# Altium footprint library Footprint.PcbLib: 411 footprints (part 3 of 26)
Each footprint in its own frame and in the unit in brackets; x right, y up, seen from the top. Pads: shape width x height; smd on the part's side, far side on the other; paste and mask are expansions set on the pad; w line width, h text height; cw(c..) or ccw(c..) is an arc to the next point about the centre after c.
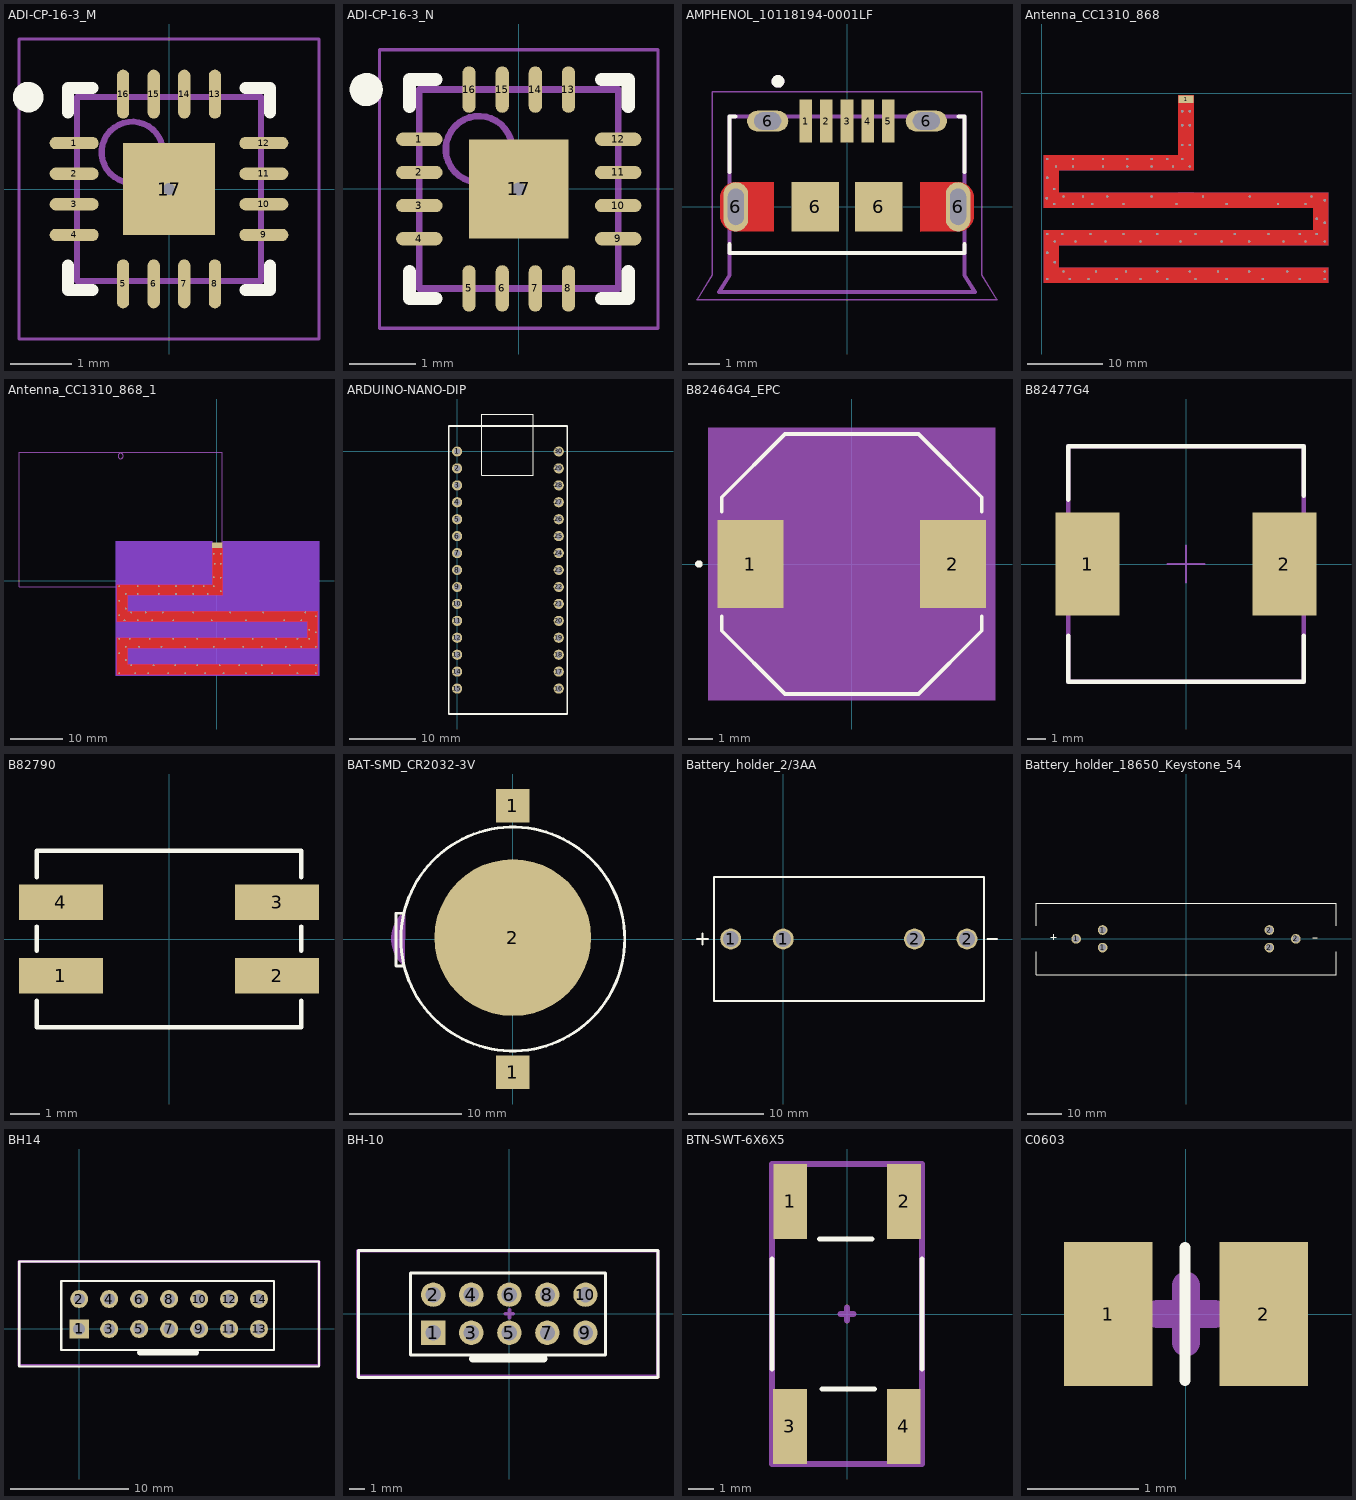
[diagram p2: the footprints below, top view; thin cyan lines are the x and y axes]

## ADI-CP-16-3_M [mm] "QFN, 16-Leads, Body 3x3mm, Pitch 0.5mm, Thermal Pad 1.5x1.5mm, IPC Low Density"
height 0.9
pads (17):
  oval 0.8x0.2 smd: 1(-1.55,0.75) 2(-1.55,0.25) 3(-1.55,-0.25) 4(-1.55,-0.75) 9(1.55,-0.75) 10(1.55,-0.25) 11(1.55,0.25) 12(1.55,0.75)
  oval 0.2x0.8 smd: 5(-0.75,-1.55) 6(-0.25,-1.55) 7(0.25,-1.55) 8(0.75,-1.55) 13(0.75,1.55) 14(0.25,1.55) 15(-0.25,1.55) 16(-0.75,1.55)
  rect 1.5x1.5 smd: 17(0,0)
via 0,0 diameter 0.5 hole 0.2
Top Overlay:
  circle w0.25: c-2.3,1.5 r0.125
  lines w0.2: -1.65,-1.25 -1.65,-1.65 -1.25,-1.65 ; -1.65,1.25 -1.65,1.65 -1.25,1.65 ; 1.25,-1.65 1.65,-1.65 1.65,-1.25 ; 1.25,1.65 1.65,1.65 1.65,1.25
Mechanical 13:
  circle w0.1: c-0.6,0.6 r0.5
  lines w0.1: -1.5,-1.5 1.5,-1.5 1.5,1.5 -1.5,1.5 -1.5,-1.5
Mechanical 15:
  lines w0.05: -2.45,-2.45 2.45,-2.45 2.45,2.45 -2.45,2.45 -2.45,-2.45
  lines w0.1: -0.5,0 0.5,0 ; 0,-0.5 0,0.5
3D body: height 0.9, standoff 0, extent -1.5,-1.5 1.5,1.5

## ADI-CP-16-3_N [mm] "QFN, 16-Leads, Body 3x3mm, Pitch 0.5mm, Thermal Pad 1.5x1.5mm, IPC Medium Density"
height 0.9
pads (17):
  oval 0.7x0.2 smd: 1(-1.5,0.75) 2(-1.5,0.25) 3(-1.5,-0.25) 4(-1.5,-0.75) 9(1.5,-0.75) 10(1.5,-0.25) 11(1.5,0.25) 12(1.5,0.75)
  oval 0.2x0.7 smd: 5(-0.75,-1.5) 6(-0.25,-1.5) 7(0.25,-1.5) 8(0.75,-1.5) 13(0.75,1.5) 14(0.25,1.5) 15(-0.25,1.5) 16(-0.75,1.5)
  rect 1.5x1.5 smd: 17(0,0)
via 0,0 diameter 0.5 hole 0.2
Top Overlay:
  circle w0.25: c-2.3,1.5 r0.125
  lines w0.2: -1.65,-1.25 -1.65,-1.65 -1.25,-1.65 ; -1.65,1.25 -1.65,1.65 -1.25,1.65 ; 1.25,-1.65 1.65,-1.65 1.65,-1.25 ; 1.25,1.65 1.65,1.65 1.65,1.25
Mechanical 13:
  circle w0.1: c-0.6,0.6 r0.5
  lines w0.1: -1.5,-1.5 1.5,-1.5 1.5,1.5 -1.5,1.5 -1.5,-1.5
Mechanical 15:
  lines w0.05: -2.1,-2.1 2.1,-2.1 2.1,2.1 -2.1,2.1 -2.1,-2.1
  lines w0.1: -0.5,0 0.5,0 ; 0,-0.5 0,0.5
3D body: height 0.9, standoff 0, extent -1.5,-1.5 1.5,1.5

## AMPHENOL_10118194-0001LF [mm] "USB_Micro-B Connector"
pads (11):
  rect 0.4x1.35 smd: 1(-1.3,2.7) 2(-0.65,2.7) 3(0,2.7) 4(0.65,2.7) 5(1.3,2.7)
  oval 0.775x1.55 hole 0.5 slot 1.15 at 90 deg: 6(-3.5,0) 6(3.5,0)
  oval 1.3x0.65 hole 0.55 slot 0.85 at 0 deg: 6(-2.5,2.7) 6(2.5,2.7)
  rect 1.5x1.55 smd: 6(-1,0) 6(1,0)
Top Layer:
  region: 192 vertices and 0 holes, not listed, extent 2.3,-0.78 4,0.775
  region: 192 vertices and 0 holes, not listed, extent -4,-0.775 -2.3,0.78
Top Overlay:
  circle w0.2: c-2.175,3.95 r0.1
  lines w0.127: -3.7,-1.18 -3.7,-1.45 3.7,-1.45 3.7,-1.18 ; -3.7,1.095 -3.7,2.85 -3.52,2.85 ; 3.52,2.85 3.7,2.85 3.7,1.095
Top Paste:
  drawing of 6 lines, arcs and shapes, not listed
Top Solder:
  region: 3.626,0.874 3.652,0.872 3.678,0.869 3.704,0.864 3.729,0.858 3.755,0.851 3.779,0.842 3.803,0.832 3.827,0.821 3.85,0.808 3.872,0.794 3.894,0.78 3.915,0.764 3.935,0.747 3.954,0.729 3.972,0.71 3.989,0.69 4.005,0.669 4.019,0.647 4.033,0.625 4.046,0.602 4.057,0.578 4.067,0.554 4.076,0.53 4.083,0.504 4.089,0.479 4.094,0.453 4.097,0.427 4.099,0.401 4.1,0.375 4.1,-0.375 4.099,-0.401 4.097,-0.427 4.094,-0.453 4.089,-0.479 4.083,-0.504 4.076,-0.53 4.067,-0.554 4.057,-0.578 4.046,-0.602 4.033,-0.625 4.019,-0.647 4.005,-0.669 3.989,-0.69 3.972,-0.71 3.954,-0.729 3.935,-0.747 3.915,-0.764 3.894,-0.78 3.872,-0.794 3.85,-0.808 3.827,-0.821 3.803,-0.832 3.779,-0.842 3.755,-0.851 3.729,-0.858 3.704,-0.864 3.678,-0.869 3.652,-0.872 3.626,-0.874 3.6,-0.875 2.2,-0.875 2.2,0.875 3.6,0.875
  region: -2.2,-0.875 -3.6,-0.875 -3.626,-0.874 -3.652,-0.872 -3.678,-0.869 -3.704,-0.864 -3.729,-0.858 -3.755,-0.851 -3.779,-0.842 -3.803,-0.832 -3.827,-0.821 -3.85,-0.808 -3.872,-0.794 -3.894,-0.78 -3.915,-0.764 -3.935,-0.747 -3.954,-0.729 -3.972,-0.71 -3.989,-0.69 -4.005,-0.669 -4.019,-0.647 -4.033,-0.625 -4.046,-0.602 -4.057,-0.578 -4.067,-0.554 -4.076,-0.53 -4.083,-0.504 -4.089,-0.479 -4.094,-0.453 -4.097,-0.427 -4.099,-0.401 -4.1,-0.375 -4.1,0.375 -4.099,0.401 -4.097,0.427 -4.094,0.453 -4.089,0.479 -4.083,0.504 -4.076,0.53 -4.067,0.554 -4.057,0.578 -4.046,0.602 -4.033,0.625 -4.019,0.647 -4.005,0.669 -3.989,0.69 -3.972,0.71 -3.954,0.729 -3.935,0.747 -3.915,0.764 -3.894,0.78 -3.872,0.794 -3.85,0.808 -3.827,0.821 -3.803,0.832 -3.779,0.842 -3.755,0.851 -3.729,0.858 -3.704,0.864 -3.678,0.869 -3.652,0.872 -3.626,0.874 -3.6,0.875 -2.2,0.875
Assembly Top:
  lines w0.127: -3.7,-1.45 3.7,-1.45 ; -3.7,-1.45 -3.7,2.85 3.7,2.85 3.7,-1.45 ; -3.7,-1.45 -3.7,-2.15 -4.025,-2.68 4.025,-2.68 3.7,-2.15 3.7,-1.45
Courtyard Top:
  lines w0.05: -4.725,-2.93 4.725,-2.93 4.25,-2.15 4.25,3.625 -4.25,3.625 -4.25,-2.15 -4.725,-2.93
Mechanical 13:
  circle w0.2: c-2.175,3.95 r0.1
3D body "10118194-0001LF--3DModel-STEP-533217.STEP": height 2.72, standoff -0.55, extent -4.025,-2.68 4.025,2.9

## Antenna_CC1310_868 [mm]
pads (84):
  rect 2x1 smd mask+0.102: 1(19.25,-0.75)
  round 0.3 hole 0.3: 5(18.75,-2.376) 6(19.75,-2.376) 7(18.75,-4.25) 8(19.75,-4.25) 9(18.75,-6.876) 10(19.75,-6.876) 11(19.75,-9.75) 12(18.75,-8.75) 13(17.5,-9.75) 14(14.673,-9.75) 15(14.673,-8.75) 16(16.75,-8.75) 17(11.423,-8.75) 18(11.423,-9.75) 19(8.173,-8.75) 20(8.173,-9.75) 21(4.173,-9.75) 22(4.173,-8.75) 23(0.75,-8.75) 24(1.923,-9.75) 25(1.673,-12.75) 26(0.75,-11.25) 27(0.673,-13.976) 28(2.923,-13.75) 29(1.673,-14.75) 30(4.173,-14.75) 31(5.5,-13.75) 32(6.75,-14.75) 33(8.75,-13.75) 34(10.923,-14.75) 35(14.673,-13.75) 36(18,-14.75) 37(21.5,-13.75) 38(24.673,-14.75) 39(27.75,-13.75) 40(31.5,-14.75) 41(36,-13.75) 42(35.173,-14.75) 43(36.673,-16.726) 44(37.75,-14.25) 45(37.75,-17.25) 46(36.673,-18.75) 47(37.75,-19.75) 48(35.173,-19.75) 49(34.423,-18.75) 50(30.25,-18.75) 51(32.25,-19.75) 52(27.673,-19.75) 53(25.75,-18.75) 54(24,-19.75) 55(20.5,-18.75) 56(18.5,-19.75) 57(15.423,-18.75) 58(13.173,-19.75) 59(10.923,-18.75) 60(8.5,-19.75) 61(6.5,-18.75) 63(4.5,-19.75) 64(2.75,-18.75) 65(0.75,-18.75) 66(1.75,-19.75) 67(1.75,-22.5) 68(2.923,-23.75) 69(0.75,-21.25) 70(0.75,-24.75) 71(3.75,-24.75) 72(6.25,-24.75) 73(10,-24.75) 74(13.173,-24.75) 75(16.75,-24.75) 76(20.5,-24.75) 77(24.673,-24.75) 78(29.5,-24.75) 79(34.423,-24.75) 80(37.75,-24.75) 81(7.25,-23.75) 82(11.25,-23.75) 83(15.423,-23.75) 84(19.75,-23.75) 85(23.5,-23.75) 86(27.673,-23.75) 87(32.75,-23.75) 88(37.75,-23.75)
Top Layer:
  region: 20.25,-0.25 18.25,-0.25 18.25,-8.25 0.25,-8.25 0.25,-15.25 36.25,-15.25 36.25,-18.25 0.25,-18.25 0.25,-25.25 38.25,-25.25 38.25,-23.25 2.25,-23.25 2.25,-20.25 38.25,-20.25 38.25,-13.25 2.25,-13.25 2.25,-10.25 20.25,-10.25
Bottom Layer:
  region: 20.25,-1.25 18.25,-1.25 18.25,-8.25 0.25,-8.25 0.25,-15.25 36.25,-15.25 36.25,-18.25 0.25,-18.25 0.25,-25.25 38.25,-25.25 38.25,-23.25 2.25,-23.25 2.25,-20.25 38.25,-20.25 38.25,-13.25 2.25,-13.25 2.25,-10.25 20.25,-10.25
3D Body Bottom:
  lines w0.025: 18.25,-13.25 19.25,-13.25 ; 19.25,-14.25 19.25,-13.25 ; 20.25,-13.25 19.25,-13.25
Multi-Layer:
  pour cut-out: 2.25,-20.25 38.25,-20.25 38.25,-23.25 2.25,-23.25
  pour cut-out: 0.25,-15.25 36.25,-15.25 36.25,-18.25 0.25,-18.25
  pour cut-out: 2.25,-10.25 20.25,-10.25 20.25,-0.25 38.25,-0.25 38.25,-13.25 2.25,-13.25
  pour cut-out: 0.25,-0.25 18.25,-0.25 18.25,-8.25 0.25,-8.25
  pour cut-out: -0.75,-0.25 -0.75,0.75 18.25,0.75 18.25,-0.25
  pour cut-out: 20.25,-0.25 20.25,0.75 39.25,0.75 39.25,-0.25
  pour cut-out: 38.25,-26.25 39.25,-26.25 39.25,-0.25 38.25,-0.25
  pour cut-out: -0.75,-25.25 -0.75,-26.25 38.25,-26.25 38.25,-25.25
  pour cut-out: 0.25,-0.25 -0.75,-0.25 -0.75,-25.25 0.25,-25.25

## Antenna_CC1310_868_1 [mm]
pads (84):
  rect 2x1 smd: 1(0.077,6.726)
  round 0.3 hole 0.3 unplated: 5(-0.6,5.1) 6(0.7,5.1) 7(-0.4,3.2) 8(0.7,3.2) 9(-0.6,0.7) 10(0.7,0.6) 11(0.7,-2) 12(-0.6,-1) 13(-1.75,-2.5) 14(-4.5,-2.5) 15(-4.5,-1) 16(-2.5,-1) 17(-7.75,-1) 18(-7.75,-2.5) 19(-11,-1) 20(-11,-2.5) 21(-15,-2.5) 22(-15,-1) 23(-18.5,-1) 24(-17.25,-2.5) 25(-17.25,-5.25) 26(-18.5,-3.75) 27(-18.5,-6.5) 28(-16.25,-6) 29(-17.5,-7.5) 30(-15,-7.5) 31(-13.5,-6) 32(-12.25,-7.5) 33(-10.25,-6) 34(-8.25,-7.5) 35(-4.5,-6) 36(-1,-7.5) 37(2.5,-6) 38(5.5,-7.5) 39(8.75,-6) 40(12.75,-7.5) 41(16.75,-6) 42(16,-7.5) 43(17.5,-9.25) 44(18.75,-6.75) 45(18.75,-9.75) 46(17.5,-11) 47(18.75,-12.5) 48(16,-12.5) 49(15.25,-11) 50(11.25,-11) 51(13,-12.5) 52(8.5,-12.5) 53(6.75,-11) 54(5,-12.5) 55(1.5,-11) 56(-0.6,-12.5) 57(-3.75,-11) 58(-6,-12.5) 59(-8.25,-11) 60(-10.5,-12.5) 61(-12.75,-11) 63(-14.75,-12.5) 64(-16.5,-11) 65(-18.5,-11) 66(-17.25,-12.5) 67(-17.25,-15) 68(-16.25,-16) 69(-18.5,-13.75) 70(-18.5,-17.5) 71(-15.5,-17.5) 72(-13,-17.5) 73(-9.25,-17.5) 74(-6,-17.5) 75(-2.25,-17.5) 76(1.25,-17.5) 77(5.5,-17.5) 78(10.5,-17.5) 79(15.25,-17.5) 80(18.75,-17.5) 81(-12,-16) 82(-7.923,-16) 83(-3.75,-16) 84(0.5,-16) 85(4.25,-16) 86(8.5,-16) 87(13.75,-16) 88(18.75,-16)
Top Layer:
  region: 1.077,6.226 -0.923,6.226 -0.923,-0.774 -18.923,-0.774 -18.923,-7.774 17.077,-7.774 17.077,-10.774 -18.923,-10.774 -18.923,-17.774 19.077,-17.774 19.077,-15.774 -16.923,-15.774 -16.923,-12.774 19.077,-12.774 19.077,-5.774 -16.923,-5.774 -16.923,-2.774 1.077,-2.774
Top Layer keep-out:
  region: 19.327,7.476 19.327,-18.024 -19.173,-18.024 -19.173,7.476 -0.923,7.476 -0.923,-0.774 -18.923,-0.774 -18.923,-7.774 17.077,-7.774 17.077,-10.774 -18.923,-10.774 -18.923,-17.774 19.077,-17.774 19.077,-15.774 -16.923,-15.774 -16.923,-12.774 19.077,-12.774 19.077,-5.774 -16.923,-5.774 -16.923,-2.774 1.077,-2.774 1.077,7.476
Bottom Layer:
  region: 1.077,6.226 -0.923,6.226 -0.923,-0.774 -18.923,-0.774 -18.923,-7.774 17.077,-7.774 17.077,-10.774 -18.923,-10.774 -18.923,-17.774 19.077,-17.774 19.077,-15.774 -16.923,-15.774 -16.923,-12.774 19.077,-12.774 19.077,-5.774 -16.923,-5.774 -16.923,-2.774 1.077,-2.774
Bottom Layer keep-out:
  region: 19.327,7.476 19.327,-18.024 -19.173,-18.024 -19.173,7.476 -0.923,7.476 -0.923,-0.774 -18.923,-0.774 -18.923,-7.774 17.077,-7.774 17.077,-10.774 -18.923,-10.774 -18.923,-17.774 19.077,-17.774 19.077,-15.774 -16.923,-15.774 -16.923,-12.774 19.077,-12.774 19.077,-5.774 -16.923,-5.774 -16.923,-2.774 1.077,-2.774 1.077,7.476
3D Body Bottom:
  lines w0.025: -0.923,-5.774 0.077,-5.774 ; 0.077,-6.774 0.077,-5.774 ; 0.077,-4.774 0.077,-5.774 ; 1.077,-5.774 0.077,-5.774
Mechanical 46:
  text "1" at -18.303,23.626 h0.2
Mechanical 55:
  circle w0.025: c-18.223,23.626 r0.502
  lines w0.025: -37.473,-1.124 -37.473,24.376 1.027,24.376 1.027,-1.124 -37.473,-1.124
Mechanical 57:
  text "JUDYTA OBUCHOWSKA" at -17.327,24.937 h0.2
Mechanical 58:
  text "ROBERT MITAL" at -17.327,24.537 h0.2
Mechanical 59:
  text "2014-08-20" at -17.327,25.287 h0.2
Mechanical 60:
  text "COPYRIGHTS 2014 @ DYNAMIC PRECISION" at -14.823,-1.324 h0.2
3D body: height 0, standoff 0, extent -19.173,-18.024 19.327,7.476
3D body: height 0, standoff 0, extent -19.173,-18.024 19.327,7.476
3D body: height 0, standoff 0, extent -37.485,-1.137 1.04,24.389

## ARDUINO-NANO-DIP [mil]
pads (30):
  round 60 hole 38: 1(0,0) 2(0,-100) 3(0,-200) 4(0,-300) 5(0,-400) 6(0,-500) 7(0,-600) 8(0,-700) 9(0,-800) 10(0,-900) 11(0,-1000) 12(0,-1100) 13(0,-1200) 14(0,-1300) 15(0,-1400) 16(600,-1400) 17(600,-1300) 18(600,-1200) 19(600,-1100) 20(600,-1000) 21(600,-900) 22(600,-800) 23(600,-700) 24(600,-600) 25(600,-500) 26(600,-400) 27(600,-300) 28(600,-200) 29(600,-100) 30(600,0)
Top Overlay:
  lines w3.94: 146.46,-140.94 449.61,-140.94 449.61,221.26 146.46,221.26 146.46,-140.94
  lines w10: 650,150 650,-1550 -50,-1550 -50,150 650.39,150.39

## B82464G4_EPC [mil]
pads (2):
  rect 106.5x142 smd paste+0 mask+0: 1(-163.25,0) 2(163.25,0)
Top Overlay:
  circle w6: c-246.5,0 r3
  lines w6: -209.5,-84.1 -209.5,-107.5 -107.5,-209.5 107.5,-209.5 209.5,-107.5 209.5,-84.1 ; -209.5,84.1 -209.5,107.5 -107.5,209.5 107.5,209.5 209.5,107.5 209.5,84.1
Assembly Bottom:
  region: 231.5,-219.5 -231.5,-219.5 -231.5,219.5 231.5,219.5
Mechanical 13:
  circle w0: c-189.5,0 r3
  lines w1: -204.5,-102.5 -204.5,102.5 -102.5,204.5 102.5,204.5 204.5,102.5 204.5,-102.5 102.5,-204.5 -102.5,-204.5 -204.5,-102.5
Mechanical 15:
  region: -226.5,-81 -226.5,81 -130,214.5 130,214.5 226.5,81 226.5,-81 130,-214.5 -130,-214.5
  lines w6: -226.5,-81 -130,-214.5 130,-214.5 226.5,-81 226.5,81 130,214.5 -130,214.5 -226.5,81 -226.5,-81
3D body "IND_B82464G4_EPC.step": height 200.98, standoff 0, extent -216.5,-204.49 216.5,204.49

## B82477G4 [mm]
pads (2):
  rect 3.5x5.6 smd: 1(-5.35,0) 2(5.35,0)
Top Overlay:
  lines w0.254: -6.4,-3.9 -6.4,-6.4 6.4,-6.4 6.4,-3.9 ; -6.4,3.5 -6.4,6.4 0,6.4 6.4,6.4 6.4,3.7
Mechanical 15:
  lines w0.1: -1,0 1,0 ; 0,-1 0,1
  lines w0.254: -6.4,-6.4 6.4,-6.4 6.4,6.4 -6.4,6.4 -6.4,-6.4
  text ".Designator" at -5.1,5.5 h1.52
3D body "User Library-b82477g4.STEP": height 8, standoff 0, extent -6.4,-6.4 6.4,6.4

## B82790 [mm]
pads (4):
  rect 2.85x1.2 smd: 1(-3.675,-1.25) 2(3.675,-1.25) 3(3.675,1.25) 4(-3.675,1.25)
Top Overlay:
  lines w0.15: -4.5,-2.1 -4.5,-3 4.5,-3 4.5,-2.1 ; -4.5,-0.4 -4.5,0.425 ; -4.5,2.1 -4.5,3 4.5,3 4.5,2.1 ; 4.5,-0.4 4.5,0.425
3D body "User Library-B82790.STEP": height -0.06, standoff -5.26, extent -4.482,-2.999 4.502,3.001

## BAT-SMD_CR2032-3V [mm]
pads (3):
  rect 3x3 smd: 1(0,-11.9) 1(0,11.9)
  round 14 smd: 2(0,0.127)
Top Overlay:
  circle w0.254: c0,0 r10
  lines w0.254: -9.728,2.317 cw(c-9.769,2.358) -9.769,2.3 -10.45,2.3 -10.45,-2.4 -9.706,-2.4
Mechanical 15:
  region: -9.6,2.5 -9.793,2.356 -10.13,2.014 -10.411,1.623 -10.628,1.194 -10.778,0.737 -10.855,0.263 -10.859,-0.218 -10.789,-0.694 -10.647,-1.153 -10.436,-1.585 -10.162,-1.98 -9.83,-2.328 -9.64,-2.475
3D body "CR2032 (2).STEP": height 3.91, standoff 0, extent -10.23,-12.254 9.569,11.746

## Battery_holder_2/3AA [mm]
pads (4):
  round 2.8 hole 2.1: 1(-7,0) 1(0,0) 2(17.5,0) 2(24.5,0)
Top Overlay:
  lines w0.254: -11.5,0 -10,0 ; -10.75,-0.75 -10.75,0.75 ; 27.25,0 28.5,0 ; -9.25,-8.25 -9.25,8 -9.25,8.25 26.75,8.25 26.75,-8.25 -9.25,-8.25
3D body "User Library-aa smt battery clip-1.STEP": height 16.69, standoff -4.02, extent -9.125,-7.998 0.4,7.798
3D body "User Library-aa smt battery clip-1.STEP": height 16.69, standoff -4.02, extent 17.1,-7.798 26.625,7.998
3D body "EEMB 14335 Bat.step": height 16.25, standoff 1.75, extent -8.3,-7.25 25.2,7.25

## Battery_holder_18650_Keystone_54 [mm]
pads (6):
  round 2.8 hole 2: 1(-31.62,0) 1(-24,-2.54) 1(-24,2.54) 2(24,-2.54) 2(24,2.54) 2(31.62,0)
Top Overlay:
  lines w0.15: -43.2,-3.7 -43.2,-10.4 43.2,-10.4 43.2,-3.7 ; -43.2,3.7 -43.2,10.3 43.2,10.3 43.2,3.7
  lines w0.254: -38.9,0.5 -37.4,0.5 ; -38.15,-0.25 -38.15,1.25 ; 36.5,0.3 37.75,0.3

## BH14 [mil]
pads (14):
  rect 64x64 hole 40: 1(0,0)
  round 60 hole 38: 2(0,100) 3(100,0) 4(100,100) 5(200,0) 6(200,100) 7(300,0) 8(300,100) 9(400,0) 10(400,100) 11(500,0) 12(500,100) 13(600,0) 14(600,100)
Top Overlay:
  lines w7.87: -200,-125 -200,225 800,225 800,-125 -200,-125 ; -60,-70 -60,160 650,160 650,-70 -60,-70
  lines w19.68: 203.35,-78.9 390.35,-78.9
Mechanical 15:
  circle w10: c0,0 r15.75
  lines w10: -200.79,-122.05 799.21,-122.05 799.21,224.41 -200.79,224.41 -200.79,-122.05 ; -200.79,-122.05 -200.79,-122.05
  text ".Designator" at 59.06,240.16 h60

## BH-10 [mil]
pads (10):
  rect 64x64 hole 40: 1(-200,-50)
  round 64 hole 40: 2(-200,50) 3(-100,-50) 4(-100,50) 5(0,-50) 6(0,50) 7(100,-50) 8(100,50) 9(200,-50) 10(200,50)
Top Overlay:
  lines w7.87: -396.85,-168.11 -396.85,166.54 390.55,166.54 390.55,-168.11 -396.85,-168.11 ; -259.06,-109.06 -259.06,107.48 252.76,107.48 252.76,-109.06 -259.06,-109.06
  lines w19.68: -96.65,-118.9 90.35,-118.9
Mechanical 15:
  circle w10: c-196.85,-51.18 r19.68
  lines w10: -10,0 10,0 ; 0,-10 0,10 ; -397.64,-165.35 389.76,-165.35 389.76,165.35 -397.64,165.35 -397.64,-165.35
  text ".Designator" at -181.1,181.1 h60
3D body "User Library-BH_10_V.step": height 354.33, standoff -118.11, extent -399.21,-179.92 400.79,178.34

## BTN-SWT-6X6X5 [mm]
pads (4):
  rect 1.35x3 smd: 1(-2.27,4.5) 2(2.28,4.5) 3(-2.28,-4.5) 4(2.27,-4.5)
Top Overlay:
  lines w0.2: -3,-2.2 -3,2.2 ; -1.1,3 1,3 ; -1,-3 1.1,-3 ; 3,-2.2 3,2.2
Mechanical 15:
  lines w0.254: -0.254,0 0.254,0 ; 0,-0.254 0,0.254 ; -3,-6 -3,6 3,6 3,-6 -3,-6
  text ".Designator" at -2.6,6.7 h1.52
3D body "User Library-SWT-34.step": height 7.35, standoff 0, extent -2.98,-5.177 3.02,5.177

## C0603 [mm]
pads (2):
  rect 0.8x1.3 smd: 1(-0.7,0) 2(0.7,0)
Top Overlay:
  lines w0.1: -0.01,-0.6 -0.01,0.6
Mechanical 15:
  lines w0.254: -0.254,0 0.254,0 ; 0,-0.254 0,0.254
  text "0,0" at 0.254,0 h1.52
3D body "User Library-CapCeramic_Kemet_0603_1608.step": height 0.77, standoff -0.02, extent -0.775,-0.375 0.825,0.425